# Altium footprint library adl5960accz.PcbLib: 1 footprints
Each footprint in its own frame and in the unit in brackets; x right, y up, seen from the top. Pads: shape width x height; smd on the part's side, far side on the other; paste and mask are expansions set on the pad; w line width, h text height; cw(c..) or ccw(c..) is an arc to the next point about the centre after c.
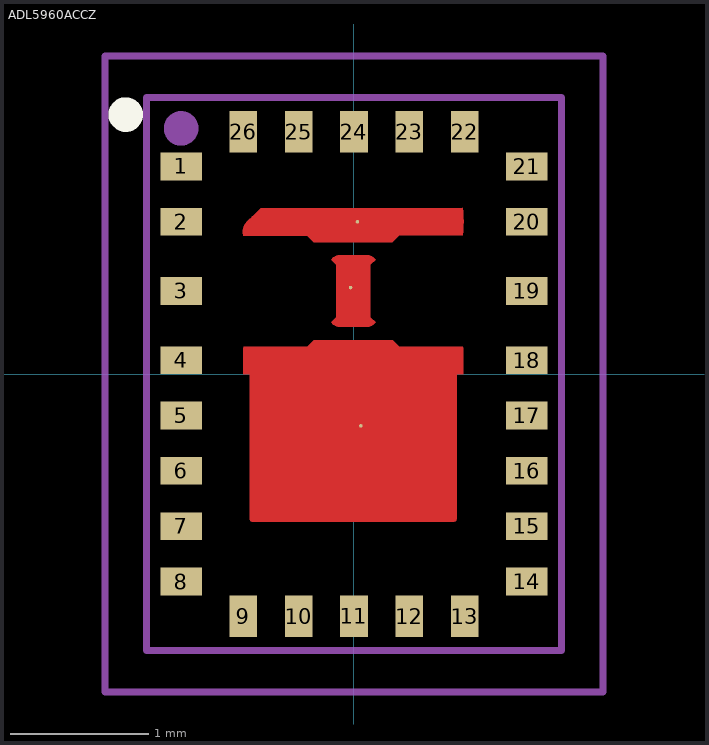
[diagram p0: the footprint, top view; thin cyan lines are the x and y axes]

## ADL5960ACCZ [mm] "LGA, 26-Leads, Body 3.00x4.00mmx0.78mm"
height 0.78
pads (29):
  rect 0.3x0.2 smd: 1(-1.25,1.5) 2(-1.25,1.1) 3(-1.25,0.6) 4(-1.25,0.1) 5(-1.25,-0.3) 6(-1.25,-0.7) 7(-1.25,-1.1) 8(-1.25,-1.5) 14(1.25,-1.5) 15(1.25,-1.1) 16(1.25,-0.7) 17(1.25,-0.3) 18(1.25,0.1) 19(1.25,0.6) 20(1.25,1.1) 21(1.25,1.5)
  rect 0.2x0.3 smd: 9(-0.8,-1.75) 10(-0.4,-1.75) 11(0,-1.75) 12(0.4,-1.75) 13(0.8,-1.75) 22(0.8,1.75) 23(0.4,1.75) 24(0,1.75) 25(-0.4,1.75) 26(-0.8,1.75)
  round 0.025 smd: 27(-0.025,0.625) 27(0.025,1.1) 27(0.05,-0.375)
Top Layer:
  region: -0.745,-1.063 -0.743,-1.064 -0.741,-1.065 -0.739,-1.066 -0.737,-1.067 -0.735,-1.067 -0.733,-1.068 -0.73,-1.068 0.719,-1.068 0.722,-1.068 0.724,-1.067 0.726,-1.067 0.729,-1.066 0.731,-1.065 0.733,-1.064 0.734,-1.063 0.736,-1.061 0.737,-1.059 0.739,-1.058 0.74,-1.056 0.741,-1.054 0.742,-1.052 0.742,-1.049 0.743,-1.047 0.743,-1.045 0.743,-1.044 0.743,-1.043 0.743,-0.002 0.79,-0.002 0.79,0.174 0.79,0.175 0.79,0.177 0.79,0.178 0.789,0.18 0.789,0.181 0.789,0.183 0.789,0.184 0.789,0.186 0.789,0.187 0.788,0.189 0.788,0.19 0.788,0.192 0.788,0.193 0.787,0.195 0.787,0.196 0.787,0.198 0.328,0.198 0.281,0.245 -0.29,0.245 -0.338,0.198 -0.798,0.198 -0.798,0.196 -0.798,0.195 -0.798,0.193 -0.799,0.192 -0.799,0.19 -0.799,0.189 -0.799,0.187 -0.8,0.186 -0.8,0.184 -0.8,0.183 -0.8,0.181 -0.8,0.18 -0.801,0.178 -0.801,0.177 -0.801,0.175 -0.801,0.174 -0.801,-0.002 -0.754,-0.002 -0.754,-1.043 -0.754,-1.044 -0.754,-1.045 -0.754,-1.047 -0.753,-1.049 -0.753,-1.052 -0.752,-1.054 -0.751,-1.056 -0.75,-1.058 -0.748,-1.059 -0.747,-1.061
  region: -0.803,1.021 -0.803,1.022 -0.803,1.024 -0.803,1.026 -0.803,1.028 -0.803,1.032 -0.803,1.037 -0.802,1.041 -0.802,1.046 -0.801,1.05 -0.8,1.054 -0.799,1.059 -0.797,1.063 -0.796,1.067 -0.794,1.071 -0.792,1.075 -0.79,1.079 -0.788,1.083 -0.786,1.087 -0.783,1.09 -0.781,1.094 -0.778,1.096 -0.774,1.101 -0.768,1.106 -0.761,1.113 -0.753,1.122 -0.744,1.13 -0.734,1.14 -0.724,1.149 -0.715,1.158 -0.706,1.167 -0.697,1.176 -0.689,1.183 -0.683,1.189 -0.678,1.194 -0.675,1.197 -0.674,1.198 0.787,1.201 0.787,1.195 0.788,1.189 0.788,1.183 0.789,1.176 0.789,1.17 0.79,1.164 0.79,1.158 0.79,1.152 0.791,1.145 0.791,1.139 0.791,1.133 0.791,1.127 0.791,1.12 0.792,1.114 0.792,1.108 0.792,1.102 0.792,1.095 0.792,1.089 0.791,1.083 0.791,1.077 0.791,1.071 0.791,1.064 0.791,1.058 0.79,1.052 0.79,1.046 0.79,1.039 0.789,1.033 0.789,1.027 0.788,1.021 0.788,1.015 0.787,1.008 0.787,1.002 0.328,1.002 0.278,0.952 -0.29,0.952 -0.34,0.999 -0.799,0.999 -0.8,1.001 -0.8,1.003 -0.801,1.005 -0.801,1.006 -0.801,1.008 -0.802,1.01 -0.802,1.012 -0.802,1.013 -0.803,1.015 -0.803,1.017 -0.803,1.019
  region: -0.144,0.354 -0.14,0.352 -0.136,0.35 -0.132,0.347 -0.128,0.346 -0.123,0.344 -0.118,0.343 -0.114,0.342 -0.109,0.341 -0.104,0.34 -0.099,0.34 0.09,0.34 0.095,0.34 0.1,0.341 0.104,0.342 0.109,0.343 0.114,0.344 0.118,0.346 0.122,0.347 0.127,0.349 0.131,0.352 0.135,0.354 0.139,0.357 0.143,0.36 0.146,0.363 0.149,0.367 0.153,0.37 0.156,0.374 0.119,0.409 0.119,0.791 0.156,0.826 0.153,0.829 0.149,0.833 0.146,0.837 0.143,0.84 0.139,0.843 0.135,0.845 0.131,0.848 0.127,0.85 0.122,0.852 0.118,0.854 0.114,0.856 0.109,0.857 0.104,0.858 0.1,0.859 0.095,0.859 0.09,0.859 -0.099,0.859 -0.104,0.859 -0.109,0.859 -0.114,0.858 -0.118,0.857 -0.123,0.855 -0.127,0.854 -0.132,0.852 -0.136,0.85 -0.14,0.848 -0.144,0.845 -0.148,0.843 -0.152,0.84 -0.155,0.836 -0.159,0.833 -0.162,0.829 -0.165,0.826 -0.129,0.791 -0.129,0.409 -0.165,0.374 -0.162,0.37 -0.159,0.367 -0.156,0.363 -0.152,0.36 -0.148,0.357
Top Overlay:
  circle w0.125: c-1.65,1.875 r0.062
Top Assembly:
  circle w0.15: c-1.25,1.775 r0.05
  lines w0.05: -1.5,-2 1.5,-2 1.5,2 -1.5,2 -1.5,-2
Top Courtyard:
  lines w0.05: -1.8,-2.3 1.8,-2.3 1.8,2.3 -1.8,2.3 -1.8,-2.3
3D body "ADL5960ACCZ.step": height 0.68, standoff 0, extent -1.5,-2 1.5,2